# Altium integrated library LibreriaRSA.IntLib: 39 symbols
Pins are listed as number, name and electrical type; pins without a type are passive.

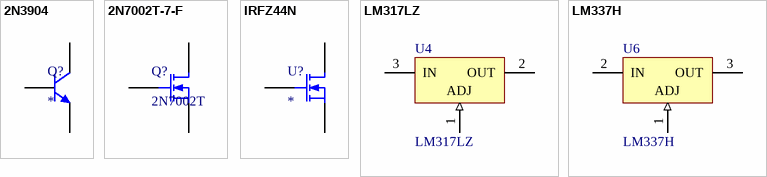
[diagram p0: symbols 2N3904 to LM337H]

## 2N3904
designator Q?
NPN General Purpose Amplifier
footprint TO92_1
pins: 1 E, 2 B, 3 C

## 2N7002T-7-F
designator Q?, comment 2N7002T
footprint SOT523 (3 Lead SC75; EIAJ-SC75; SOT523; SOT416?)
pins: 1 G, 2 S, 3 D

## IRFZ44N
designator U?
footprint TO-220V
pins: 1 G, 2 D, 3 S

## LM317LZ
designator U4
1.2V to 37V Voltage Regulator; Published: 24-Aug-2001; LatestRevisionDate: 17-Jul-2002; LatestRevisionNote: Re-released for DXP Platform.; DatasheetVersion: Apr-1994; PackageReference: TO92-132; Publisher: Altium Limited; PackageDescription: TO, Flat Index; 3 In-Line, Axial Leads; Body Dia. 4.8mm; Leads 0.51 x 0.51 mm (max); ComponentLink1Description: Manufacturer Link; ComponentLink1URL: http://www.st.com/; ComponentLink2Description: Datasheet; ComponentLink2URL: http://www.st.com/stonline/products/literature/ds/2168/lm217l.pdf
footprint TO-92B_2 (LM317)
footprint TO-220V
pins: 1 ADJ (in), 2 OUT (power), 3 IN (power)

## LM337H
designator U6
Adjustable Negative Voltage Regulator; Published: 24-Aug-2001; LatestRevisionDate: 17-Jul-2002; LatestRevisionNote: Re-released for DXP Platform.; DatasheetVersion: Mar-1993; PackageReference: TO-39; Publisher: Altium Limited; PackageDescription: Can; 3 Leads; Pin Circle Dia. 5.08 mm; Lead Dia. 0.49 mm (max); ComponentLink1Description: Manufacturer Link; ComponentLink1URL: http://www.st.com/; ComponentLink2Description: Datasheet; ComponentLink2URL: http://www.st.com/stonline/products/literature/ds/2167/lm137.pdf
footprint TO-220V
pins: 1 ADJ (in), 2 IN (power), 3 OUT (power)


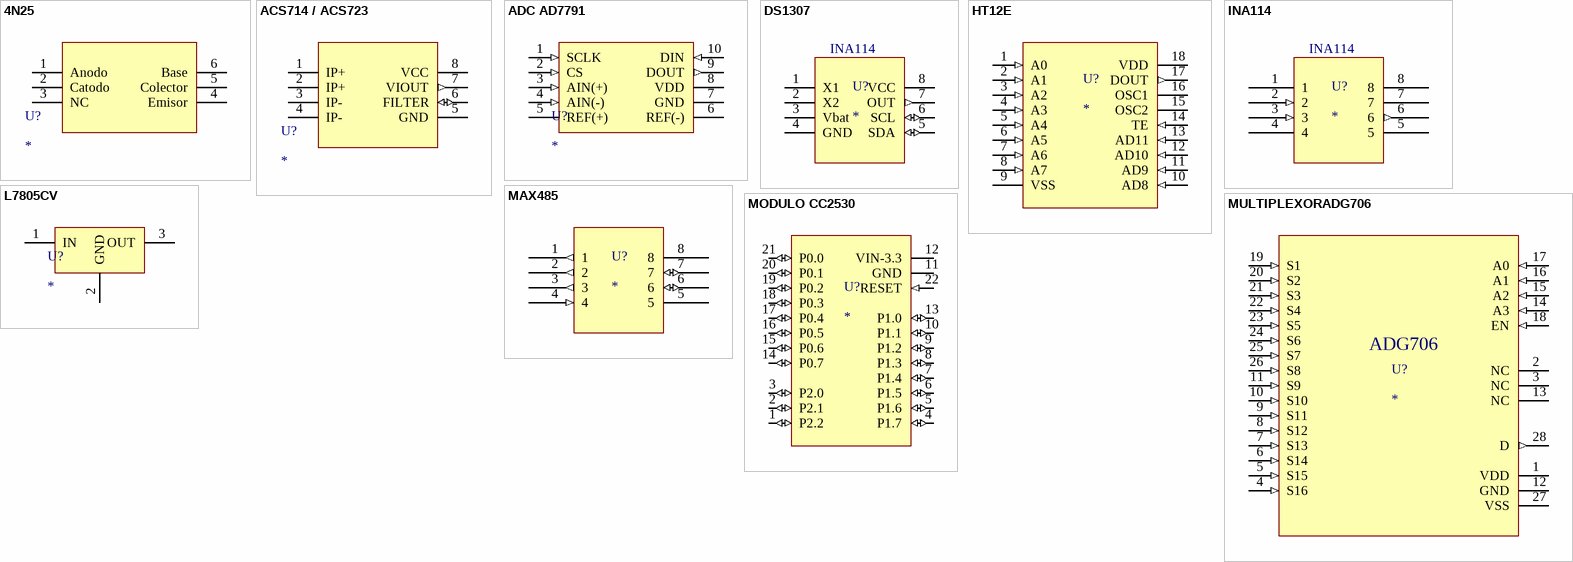
[diagram p1: symbols 4N25 to MULTIPLEXORADG706]

## 4N25
designator U?
Optoacoplador
footprint 4N25
pins: 1 Anodo "RG1", 2 Catodo "VIN-", 3 NC (power) "VIN+", 4 Emisor "VO", 5 Colector "V+", 6 Base (power) "RG2"

## ACS714 / ACS723
designator U?
Adaptador sensor de corriente
footprint ACS714/ACS723
pins: 1 IP+ "RG1", 2 IP+ "VIN-", 3 IP- (power) "VIN+", 4 IP- (power) "V-", 5 GND (power) "REF-GND", 6 FILTER (io) "VO", 7 VIOUT (out) "V+", 8 VCC (power) "RG2"

## ADC AD7791
designator U?
ADC de 24bits SPI
footprint ADC AD7791
pins: 1 SCLK (in) "RG1", 2 CS (in) "VIN-", 3 AIN(+) (in) "VIN+", 4 AIN(-) (in) "VIN+", 5 REF(+) (power) "VIN+", 6 REF(-) (power) "RG2", 7 GND (power) "VO", 8 VDD (power) "V+", 9 DOUT (out) "V+", 10 DIN (in) "V+"

## DS1307
designator U?
footprint MAX485
pins: 1 X1 "RG1", 2 X2 "VIN-", 3 Vbat (power) "VIN+", 4 GND (power) "V-", 5 SDA (io) "REF-GND", 6 SCL (io) "VO", 7 OUT (out) "V+", 8 VCC (power) "RG2"
text: INA114

## HT12E
designator U?
footprint D-18 (DIP; 18 Leads; Row Spacing 7.62 mm; Pitch 2.54 mm)
pins: 1 A0 (in) "RG1", 2 A1 (in) "VIN-", 3 A2 (in) "VIN+", 4 A3 (in) "VIN+", 5 A4 (in) "VIN+", 6 A5 (in) "RG2", 7 A6 (in) "VO", 8 A7 (in) "V+", 9 VSS (power) "V+", 10 AD8 (in) "V+", 11 AD9 (in) "V+", 12 AD10 (in) "V+", 13 AD11 (in) "V+", 14 TE (in) "V+", 15 OSC2 "V+", 16 OSC1 "V+", 17 DOUT (out) "V+", 18 VDD (power) "V+"

## INA114
designator U?
footprint MAX485
pins: 1 "RG1", 2 (in) "VIN-", 3 (in) "VIN+", 4 (power) "V-", 5 (power) "REF-GND", 6 (out) "VO", 7 (power) "V+", 8 "RG2"

## L7805CV
designator U?
Rectificador de Tension
footprint TO220_1
pins: 1 IN, 2 GND, 3 OUT

## MAX485
designator U?
footprint MAX485
pins: 1 (out) "RO", 2 (out) "RE", 3 (out) "DE", 4 (in) "DI", 5 (power) "GND", 6 (io) "A", 7 (io) "B", 8 (power) "VCC"

## MODULO CC2530
designator U?
ZigBee
footprint MODULO CC2530
pins: 1 P2.2 (io), 2 P2.1 (io), 3 P2.0 (io), 4 P1.7 (io), 5 P1.6 (io), 6 P1.5 (io), 7 P1.4 (io), 8 P1.3 (io), 9 P1.2 (io), 10 P1.1 (io), 11 GND (power), 12 VIN-3.3 (power), 13 P1.0 (io), 14 P0.7 (io), 15 P0.6 (io), 16 P0.5 (io), 17 P0.4 (io), 18 P0.3 (io), 19 P0.2 (io), 20 P0.1 (io), 21 P0.0 (io), 22 RESET (in)

## MULTIPLEXORADG706
designator U?
footprint MULTIPLEXORADG706
footprint MULTIPLEXORADG706SMD
pins: 1 VDD (power), 2 NC, 3 NC, 4 S16 (in), 5 S15 (in), 6 S14 (in), 7 S13 (in), 8 S12 (in), 9 S11 (in), 10 S10 (in), 11 S9 (in), 12 GND (power), 13 NC, 14 A3 (in), 15 A2 (in), 16 A1 (in), 17 A0 (in), 18 EN (in), 19 S1 (in), 20 S2 (in), 21 S3 (in), 22 S4 (in), 23 S5 (in), 24 S6 (in), 25 S7 (in), 26 S8 (in), 27 VSS (power), 28 D (out)
text: ADG706


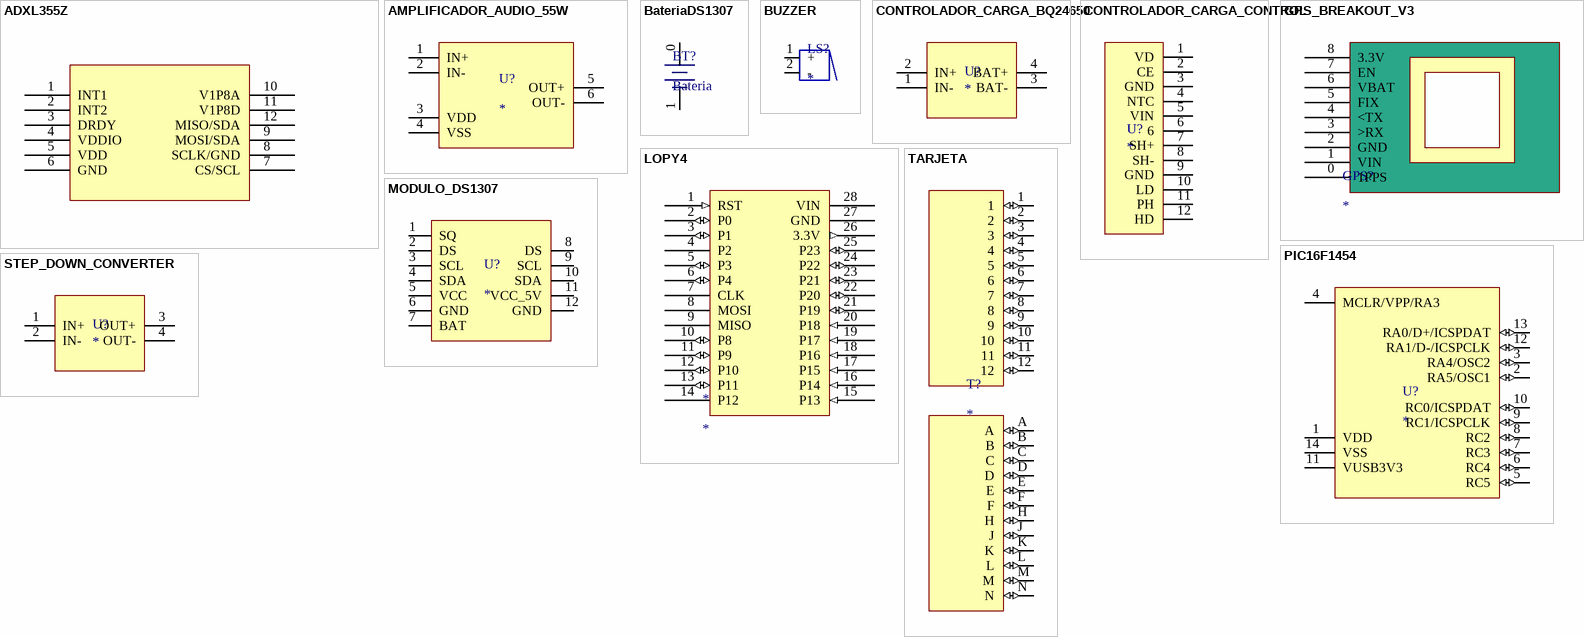
[diagram p2: symbols ADXL355Z to TARJETA]

## ADXL355Z
designator U?
footprint ADXL355Z
pins: 1 INT1, 2 INT2, 3 DRDY, 4 VDDIO, 5 VDD, 6 GND, 7 CS/SCL, 8 SCLK/GND, 9 MOSI/SDA, 10 V1P8A, 11 V1P8D, 12 MISO/SDA

## AMPLIFICADOR_AUDIO_55W
designator U?
Amplificador de audio de 55W
footprint AMPLIFICADOR_AUDIO_55W
pins: 1 IN+ "RG1", 2 IN- "VIN-", 3 VDD (power) "VIN+", 4 VSS "VO", 5 OUT+ (power) "RG2", 6 OUT- "V+"

## BateriaDS1307
designator BT?, comment Bateria
footprint BateriaDS1307
pins: 0 +, 1 -

## BUZZER
designator LS?
footprint BUZZER_11mm
pins: 1 +, 2 -

## CONTROLADOR_CARGA_BQ24650
designator U?
footprint CONTROLADOR_CARGA_BQ24650
pins: 1 IN- (power), 2 IN+ (power), 3 BAT- (power), 4 BAT+ (power)

## CONTROLADOR_CARGA_CONTROL
designator U?
footprint CONTROLADOR_CARGA_CONTROL
pins: 1 VD, 2 CE, 3 GND, 4 NTC, 5 VIN, 6, 7 SH+, 8 SH-, 9 GND, 10 LD, 11 PH, 12 HD

## GPS_BREAKOUT_V3
designator GPS?
footprint GPS_BREAKOUT_V3
pins: 0 1PPS, 1 VIN, 2 GND, 3 >RX, 4 <TX, 5 FIX, 6 VBAT, 7 EN, 8 3.3V

## LOPY4
designator *
pins: 1 RST (in), 2 P0 (io), 3 P1 (io), 4 P2, 5 P3 (io), 6 P4 (io), 7 CLK, 8 MOSI, 9 MISO, 10 P8 (io), 11 P9 (io), 12 P10 (io), 13 P11 (io), 14 P12, 15 P13 (in), 16 P14 (in), 17 P15 (in), 18 P16 (in), 19 P17 (in), 20 P18 (in), 21 P19 (io), 22 P20 (io), 23 P21 (io), 24 P22 (io), 25 P23 (io), 26 3.3V (out), 27 GND (power), 28 VIN (power)

## MODULO_DS1307
designator U?
MODULO DS1307 Y MEMORIA I2C
footprint MODULO_DS1307
pins: 1 SQ, 2 DS, 3 SCL, 4 SDA, 5 VCC, 6 GND, 7 BAT, 8 DS, 9 SCL, 10 SDA, 11 VCC_5V, 12 GND

## PIC16F1454
designator U?
footprint DIP-14
pins: 1 VDD, 2 RA5/OSC1 (io), 3 RA4/OSC2 (io), 4 MCLR/VPP/RA3, 5 RC5 (io), 6 RC4 (io), 7 RC3 (io), 8 RC2 (io), 9 RC1/ICSPCLK (io), 10 RC0/ICSPDAT (io), 11 VUSB3V3, 12 RA1/D-/ICSPCLK (io), 13 RA0/D+/ICSPDAT (io), 14 VSS

## STEP_DOWN_CONVERTER
designator U?
footprint STEP_DOWN_CONVERTER
pins: 1 IN+, 2 IN-, 3 OUT+, 4 OUT-

## TARJETA
designator T?
footprint TARJETA_CONTROLADOR
footprint TARJETA_AMPLIFICADOR
pins: 1 (io), 2 (io), 3 (io), 4 (io), 5 (io), 6 (io), 7 (io), 8 (io), 9 (io), 10 (io), 11 (io), 12 (io), A (io), B (io), C (io), D (io), E (io), F (io), H (io), J (io), K (io), L (io), M (io), N (io)


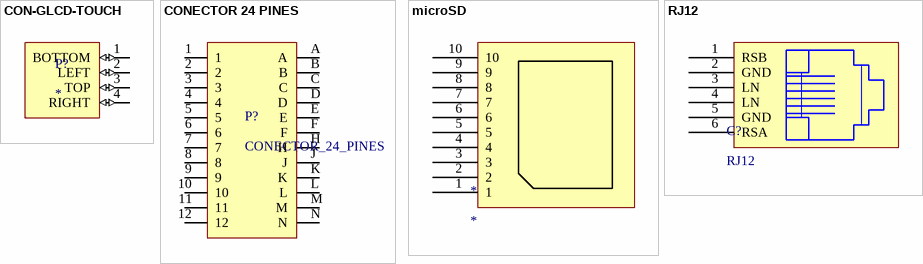
[diagram p3: symbols CON-GLCD-TOUCH to RJ12]

## CON-GLCD-TOUCH
designator P?
footprint CON-GLCD-TOUCH
pins: 1 BOTTOM (io), 2 LEFT (io), 3 TOP (io), 4 RIGHT (io)

## CONECTOR 24 PINES
designator P?, comment CONECTOR_24_PINES
footprint CONECTOR_24_PINES
pins: 1, 2, 3, 4, 5, 6, 7, 8, 9, 10, 11, 12, A, B, C, D, E, F, H, J, K, L, M, N

## microSD
designator *
footprint microSD_1
pins: 1, 2, 3, 4, 5, 6, 7, 8, 9, 10

## RJ12
designator C?
footprint RJ12_1
pins: 1 RSB, 2 GND, 3 LN, 4 LN, 5 GND, 6 RSA


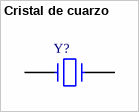
[diagram p4: symbol Cristal de cuarzo]

## Cristal de cuarzo
designator Y?  (value not drawn)
footprint Cristal  montaje (Cristal de cuarzo de montaje superficial)
footprint Cristal mini (Cristal de cuarzo empaque pequeño)
pins: 1, 2


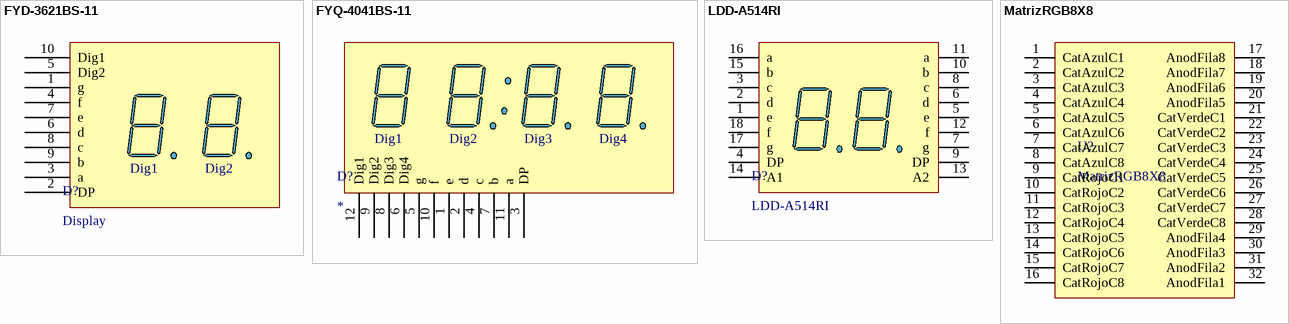
[diagram p5: symbols FYD-3621BS-11 to MatrizRGB8X8]

## FYD-3621BS-11
designator D?, comment Display
footprint FYD-3621BS-11
pins: 1 g, 2 DP, 3 a, 4 f, 5 Dig2, 6 d, 7 e, 8 c, 9 b, 10 Dig1

## FYQ-4041BS-11
designator D?
footprint FYQ-4041BS-11
pins: 1 e, 2 d, 3 DP, 4 c, 5 g, 6 Dig4, 7 b, 8 Dig3, 9 Dig2, 10 f, 11 a, 12 Dig1

## LDD-A514RI
designator D?
DISPLAY 2 DIG ANODO COMUN
footprint DISPLAY7x2_1
pins: 1 e "Anode", 2 d "Anode", 3 c "Anode", 4 DP "Anode", 5 e "Anode", 6 d "Anode", 7 g "Anode", 8 c "Anode", 9 DP "Anode", 10 b "Anode", 11 a "Anode", 12 f "Anode", 13 A2 "Common Cathode", 14 A1 "Common Cathode", 15 b "Anode", 16 a "Anode", 17 g "Anode", 18 f "Anode"

## MatrizRGB8X8
designator U?
footprint MatrizRGB8X8
pins: 1 CatAzulC1, 2 CatAzulC2, 3 CatAzulC3, 4 CatAzulC4, 5 CatAzulC5, 6 CatAzulC6, 7 CatAzulC7, 8 CatAzulC8, 9 CatRojoC1, 10 CatRojoC2, 11 CatRojoC3, 12 CatRojoC4, 13 CatRojoC5, 14 CatRojoC6, 15 CatRojoC7, 16 CatRojoC8, 17 AnodFila8, 18 AnodFila7, 19 AnodFila6, 20 AnodFila5, 21 CatVerdeC1, 22 CatVerdeC2, 23 CatVerdeC3, 24 CatVerdeC4, 25 CatVerdeC5, 26 CatVerdeC6, 27 CatVerdeC7, 28 CatVerdeC8, 29 AnodFila4, 30 AnodFila3, 31 AnodFila2, 32 AnodFila1


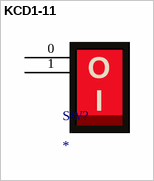
[diagram p6: symbol KCD1-11]

## KCD1-11
designator SW?
footprint KCD1-11
pins: 0, 1
text: O / I


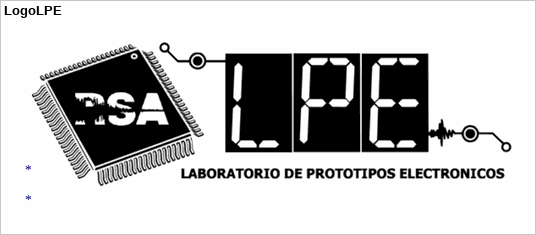
[diagram p7: symbol LogoLPE]

## LogoLPE
designator *
footprint LogoLPE_TOP (Logo del laboratorio de prototipos electronicos)


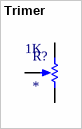
[diagram p8: symbol Trimer]

## Trimer
designator R?  value 1K
Trimer
footprint Trimer1
pins: 1 TOP, 2 BOT, 3 TAP